# Altium integrated library RCW_IntLib.IntLib: 93 symbols (part 2 of 3)
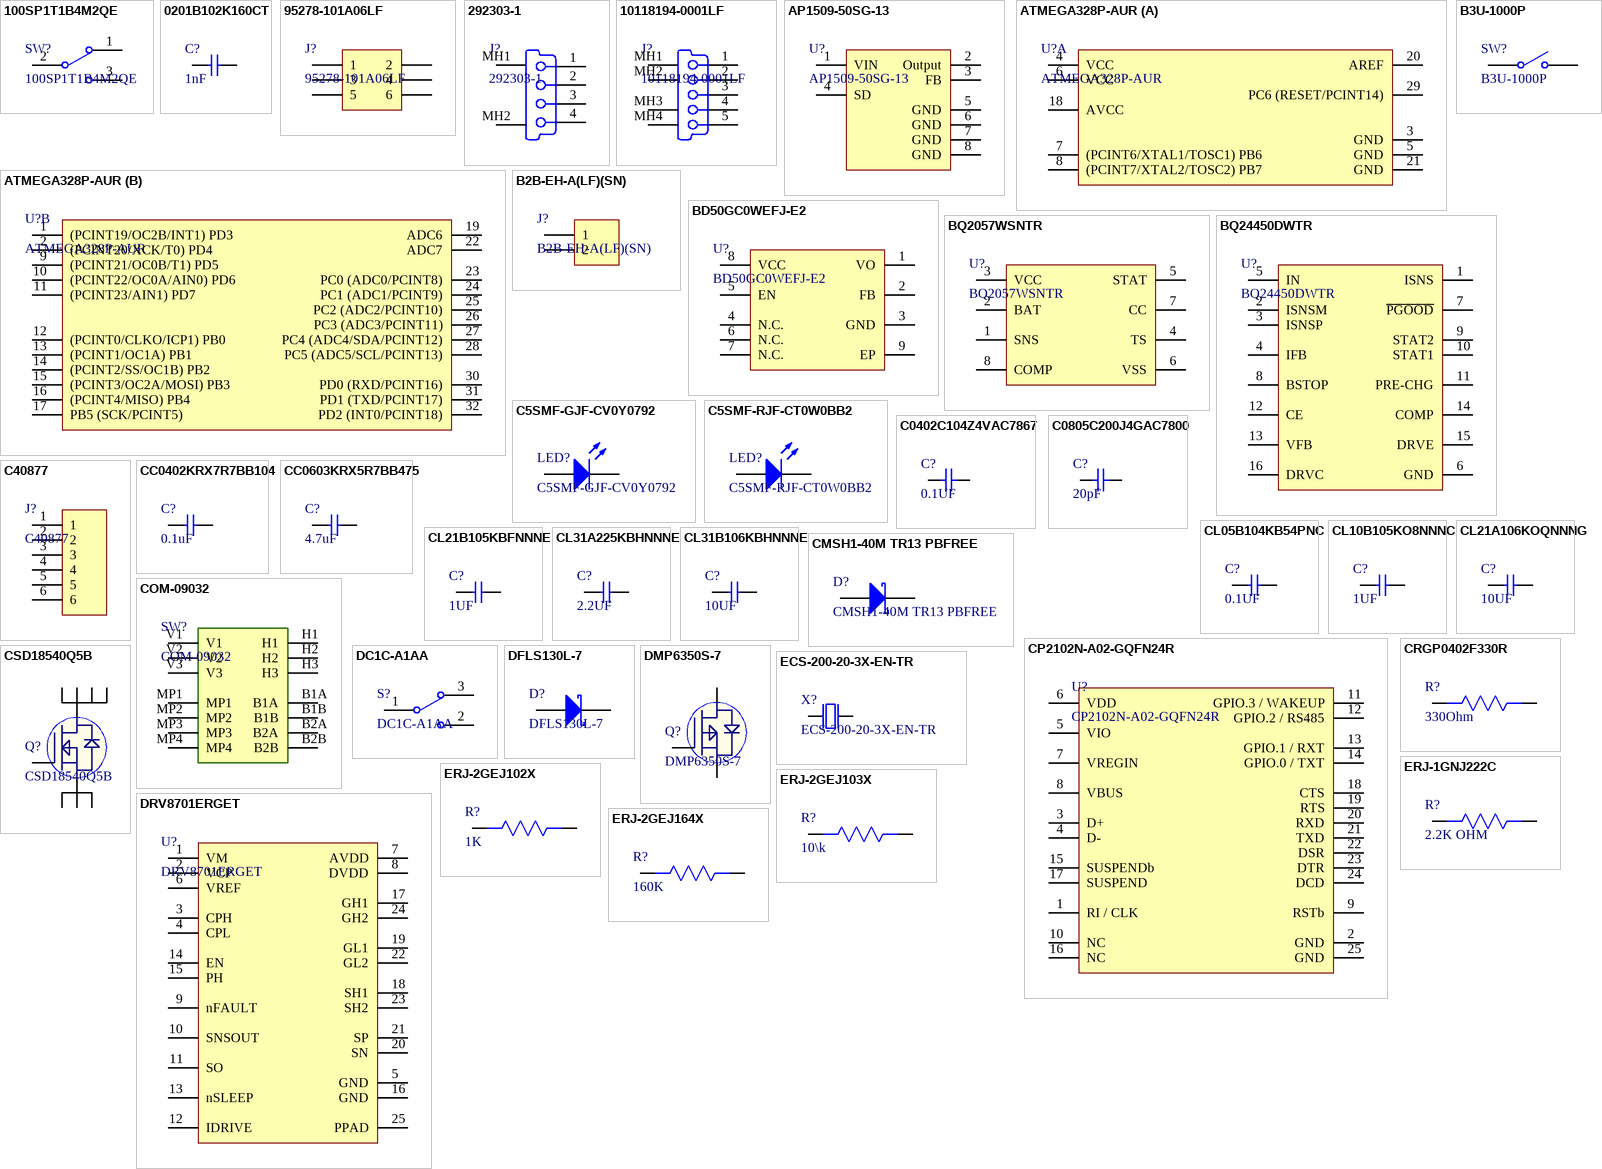
[diagram p3: symbols 100SP1T1B4M2QE to ERJ-2GEJ164X]

## DMP6350S-7
designator Q?
MOSFET P-CHA 60V 720MW SOT23; Manufacturer: Diodes; Continuous Drain Current (ID): 1.5A; Rds On Max: 350mR; Input Capacitance: 206pF; Supplier 1: Digi-Key; Manufacturer Part Number: DMP6350S-7; Stock 1: 30890; Pricing 1: 1=0.41, 10=0.355, 25=0.3316, 100=0.2463, 500=0.19232, 1000=0.15632 (USD); Mount: Surface Mount; Case/Package: TO-236-3; Min Operating Temperature: -55°C; Max Operating Temperature: 150°C; Packaging: Tape and Reel; Drain to Source Voltage (Vdss): 60V; Max Power Dissipation: 720mW; ComponentLink1URL: http://www.farnell.com/datasheets/2814435.pdf?src-supplier=Newark; ComponentLink1Description: http://www.farnell.com/datasheets/2814435.pdf?src-supplier=Newark; ComponentLink2URL: http://www.farnell.com/datasheets/2814435.pdf?src-supplier=Farnell; ComponentLink2Description: http://www.farnell.com/datasheets/2814435.pdf?src-supplier=Farnell; ComponentLink3URL: https://www.diodes.com/assets/Datasheets/DMP6350S.pdf?src-supplier=Digi-Key; ComponentLink3Description: https://www.diodes.com/assets/Datasheets/DMP6350S.pdf?src-supplier=Digi-Key; ComponentLink4URL: http://www.farnell.com/datasheets/2814435.pdf?src-supplier=Element14; ComponentLink4Description: http://www.farnell.com/datasheets/2814435.pdf?src-supplier=Element14; Supplier Part Number 1: DMP6350S-7DICT-ND
footprint SOT23-3 (SOT23, 3-Leads, Body 2.9x1.3mm, Pitch 0.95mm, Lead Span 2.3mm - Reverse Pinning, IPC High Density)
pins: 1 G, 2 S, 3 D

## DRV8701ERGET
designator U?
Motor Driver Power MOSFET Parallel 24-VQFN (4x4); Manufacturer: Texas Instruments; Supplier 1: Digi-Key; Manufacturer Part Number: DRV8701ERGET; Stock 1: 10031; Pricing 1: 1=2.37, 10=2.133, 25=2.0124, 100=1.61 (USD); Mount: Surface Mount; Case/Package: VQFN; Min Operating Temperature: -40°C; Max Operating Temperature: 125°C; Packaging: Tape and Reel; Interface: Parallel; Lead Free: Lead Free; ComponentLink1URL: http://www.ti.com/general/docs/lit/getliterature.tsp?genericPartNumber=DRV8701&&fileType=pdf&src-supplier=Avnet; ComponentLink1Description: http://www.ti.com/general/docs/lit/getliterature.tsp?genericPartNumber=DRV8701&&fileType=pdf&src-supplier=Avnet; ComponentLink2URL: http://www.ti.com/lit/ds/symlink/drv8701.pdf?src-supplier=Digi-Key; ComponentLink2Description: http://www.ti.com/lit/ds/symlink/drv8701.pdf?src-supplier=Digi-Key; Supplier Part Number 1: 296-42155-1-ND
footprint DRV8701ERGET (Motor Driver Power MOSFET Parallel 24-VQFN (4x4))
pins: 1 VM, 2 VCP, 3 CPH, 4 CPL, 5 GND, 6 VREF, 7 AVDD, 8 DVDD, 9 nFAULT, 10 SNSOUT, 11 SO, 12 IDRIVE , 13 nSLEEP , 14 EN, 15 PH, 16 GND, 17 GH1, 18 SH1, 19 GL1, 20 SN, 21 SP, 22 GL2, 23 SH2, 24 GH2, 25 PPAD

## ECS-200-20-3X-EN-TR
designator X?
20MHz ±30ppm Crystal 20pF 50 Ohms HC-49/U; Manufacturer: ECS International; ESR (Equivalent Series Resistance): 50R; Frequency Stability: 50ppm; Supplier 1: Digi-Key; Manufacturer Part Number: ECS-200-20-3X-EN-TR; Stock 1: 19197; Pricing 1: 1=0.53, 10=0.44, 50=0.396, 100=0.352, 500=0.3344, 1000=0.2816 (USD); Mount: Surface Mount; Min Operating Temperature: -40°C; Max Operating Temperature: 85°C; Package Quantity: 1; Frequency: 20MHz; Frequency Tolerance: 30ppm; Load Capacitance: 20pF; Packaging: Tape and Reel; Tolerance: 30ppm; Termination: SMD/SMT; Length: 0.276inch; Height: 0.091inch; Width: 0.161inch; Lead Free: Lead Free; ComponentLink1URL: http://www.ecsxtal.com/store/pdf/CSM-3X.pdf?src-supplier=Digi-Key; ComponentLink1Description: http://www.ecsxtal.com/store/pdf/CSM-3X.pdf?src-supplier=Digi-Key; Supplier Part Number 1: XC1796DKR-ND
footprint ECS-200-20-3X-EN-TR (20MHz ±30ppm Crystal 20pF 50 Ohms HC-49/US)
pins: 1 inp, 2 out

## ERJ-1GNJ222C
designator R?, comment 2.2K OHM
RES SMD 2.2K OHM 5% 1/20W 0201; Manufacturer: Panasonic; Manufacturer Part Number: ERJ-1GNJ222C; Resistance: 2.2kR; Power Rating: 50mW; Voltage Rating: 25V; Temperature Coefficient: 200ppm/°C; Supplier 1: Digi-Key; Stock 1: 63119; Pricing 1: 1=0.1, 10=0.027, 100=0.011, 1000=0.00496, 2500=0.0043, 5000=0.00355 (USD); Mount: Surface Mount; Case/Package: 0201; Case Code (Metric): 0603; Case Code (Imperial): 0201; Min Operating Temperature: -55°C; Max Operating Temperature: 125°C; Package Quantity: 15000; Tolerance: 5%; Packaging: Tape and Reel; Composition: Thick Film; Number of Terminations: 2; Max Power Dissipation: 50mW; Length: 0.024inch; Height: 0.01inch; Width: 0.012inch; Supplier Part Number 1: P123277DKR-ND
footprint Res-0201
pins: 1, 2

## ERJ-2GEJ102X
designator R?, comment 1K
RES SMD 1K OHM 5% 1/10W 0402; Manufacturer: Panasonic; Manufacturer Part Number: ERJ-2GEJ102X; Resistance: 1kR; Temperature Coefficient: 200ppm/°C; Voltage Rating: 50V; Power Rating: 100mW; Supplier 1: Digi-Key; Stock 1: 3855795; Pricing 1: 1=0.1, 10=0.032, 100=0.0129, 1000=0.00578, 2500=0.00502, 5000=0.00414 (USD); Mount: Surface Mount; Case/Package: 0402; Contact Plating: Tin; Case Code (Metric): 1005; Case Code (Imperial): 0402; Min Operating Temperature: -55°C; Max Operating Temperature: 155°C; Tolerance: 5%; Composition: Thick Film; Packaging: Tape and Reel; Package Quantity: 1; Number of Terminations: 2; Termination: SMD/SMT; Military Standard: Not; Max Power Dissipation: 100mW; Voltage Rating (DC): 50V; Features: Automotive AEC-Q200; Working Voltage: 50V; Length: 1mm; Height: 0.35mm; Width: 0.02inch; Depth: 0.5mm; Radiation Hardening: No; REACH SVHC: No SVHC; Lead Free: Lead Free; ComponentLink1URL: https://industrial.panasonic.com/cdbs/www-data/pdf/RDA0000/AOA0000C301.pdf?src-supplier=Future+Electronics; ComponentLink1Description: https://industrial.panasonic.com/cdbs/www-data/pdf/RDA0000/AOA0000C301.pdf?src-supplier=Future+Electronics; ComponentLink2URL: http://www.jameco.com/Jameco/Products/ProdDS/1986781.pdf?src-supplier=Jameco; ComponentLink2Description: http://www.jameco.com/Jameco/Products/ProdDS/1986781.pdf?src-supplier=Jameco; ComponentLink3URL: http://www.farnell.com/datasheets/2059623.pdf?src-supplier=Farnell; ComponentLink3Description: http://www.farnell.com/datasheets/2059623.pdf?src-supplier=Farnell; ComponentLink4URL: http://industrial.panasonic.com/www-data/pdf/AOA0000/AOA0000CE1.pdf?src-supplier=Avnet; ComponentLink4Description: http://industrial.panasonic.com/www-data/pdf/AOA0000/AOA0000CE1.pdf?src-supplier=Avnet; ComponentLink5URL: http://www.alliedelec.com/m/d/51cd0790071e1666bdb9d00c57fcf960.pdf?src-supplier=Allied+Electronics; ComponentLink5Description: http://www.alliedelec.com/m/d/51cd0790071e1666bdb9d00c57fcf960.pdf?src-supplier=Allied+Electronics; ComponentLink6URL: http://industrial.panasonic.com/www-data/pdf/AOA0000/AOA0000CE1.pdf?src-supplier=Avnet+Europe; ComponentLink6Description: http://industrial.panasonic.com/www-data/pdf/AOA0000/AOA0000CE1.pdf?src-supplier=Avnet+Europe; ComponentLink7URL: http://www.farnell.com/datasheets/2059623.pdf?src-supplier=Element14; ComponentLink7Description: http://www.farnell.com/datasheets/2059623.pdf?src-supplier=Element14; ComponentLink8URL: http://industrial.panasonic.com/cdbs/www-data/pdf/RDA0000/AOA0000C301.pdf?src-supplier=Farnell; ComponentLink8Description: http://industrial.panasonic.com/cdbs/www-data/pdf/RDA0000/AOA0000C301.pdf?src-supplier=Farnell; ComponentLink9URL: http://industrial.panasonic.com/www-data/pdf/AOA0000/AOA0000CE1.pdf?src-supplier=Avnet+Asia; ComponentLink9Description: http://industrial.panasonic.com/www-data/pdf/AOA0000/AOA0000CE1.pdf?src-supplier=Avnet+Asia; Supplier Part Number 1: P1.0KJCT-ND
footprint Res0402
pins: 1, 2

## ERJ-2GEJ103X
designator R?, comment 10\k
10 kOhms ±5% 0.1W, 1/10W Chip Resistor 0402 (1005 Metric) Automotive AEC-Q200 Thick Film; Manufacturer: Panasonic; Manufacturer Part Number: ERJ-2GEJ103X; Resistance: 10kR; Temperature Coefficient: 200ppm/°C; Power Rating: 100mW; Voltage Rating: 50V; Supplier 1: Digi-Key; Stock 1: 3175387; Pricing 1: 1=0.1, 10=0.028, 100=0.0115, 1000=0.00517, 2500=0.00448, 5000=0.00371 (USD); Mount: Surface Mount; Case/Package: 0402; Contact Plating: Tin; Case Code (Metric): 1005; Case Code (Imperial): 0402; Min Operating Temperature: -55°C; Max Operating Temperature: 155°C; Tolerance: 5%; Packaging: Cut Tape; Composition: Thick Film; Package Quantity: 1; Number of Terminations: 2; Termination: SMD/SMT; Military Standard: Not; Max Power Dissipation: 100mW; Voltage Rating (DC): 50V; Features: Automotive AEC-Q200; Length: 1mm; Height: 0.35mm; Depth: 0.5mm; Width: 0.02inch; Radiation Hardening: No; REACH SVHC: No SVHC; Lead Free: Lead Free; ComponentLink1URL: http://industrial.panasonic.com/www-data/pdf/AOA0000/AOA0000CE1.pdf?src-supplier=Avnet+Europe; ComponentLink1Description: http://industrial.panasonic.com/www-data/pdf/AOA0000/AOA0000CE1.pdf?src-supplier=Avnet+Europe; ComponentLink2URL: http://www.farnell.com/datasheets/1678796.pdf?src-supplier=Element14; ComponentLink2Description: http://www.farnell.com/datasheets/1678796.pdf?src-supplier=Element14; ComponentLink3URL: http://www.mouser.com/ds/2/315/AOA0000CE1-37422.pdf?src-supplier=Mouser; ComponentLink3Description: http://www.mouser.com/ds/2/315/AOA0000CE1-37422.pdf?src-supplier=Mouser; ComponentLink4URL: http://industrial.panasonic.com/cdbs/www-data/pdf/RDA0000/AOA0000C301.pdf?src-supplier=Farnell; ComponentLink4Description: http://industrial.panasonic.com/cdbs/www-data/pdf/RDA0000/AOA0000C301.pdf?src-supplier=Farnell; ComponentLink5URL: https://www.alliedelec.com/m/d/51cd0790071e1666bdb9d00c57fcf960.pdf?src-supplier=Allied+Electronics; ComponentLink5Description: https://www.alliedelec.com/m/d/51cd0790071e1666bdb9d00c57fcf960.pdf?src-supplier=Allied+Electronics; ComponentLink6URL: http://www.jameco.com/Jameco/Products/ProdDS/1935721.pdf?src-supplier=Jameco; ComponentLink6Description: http://www.jameco.com/Jameco/Products/ProdDS/1935721.pdf?src-supplier=Jameco; ComponentLink7URL: http://industrial.panasonic.com/www-data/pdf/AOA0000/AOA0000CE1.pdf?src-supplier=Avnet; ComponentLink7Description: http://industrial.panasonic.com/www-data/pdf/AOA0000/AOA0000CE1.pdf?src-supplier=Avnet; Supplier Part Number 1: P10KJDKR-ND
footprint Res0402
pins: 1, 2

## ERJ-2GEJ164X
designator R?, comment 160K
RES SMD 160K OHM 5% 1/10W 0402; Manufacturer: Panasonic; Manufacturer Part Number: ERJ2GEJ164X; Resistance: 160kR; Power Rating: 100mW; Voltage Rating: 50V; Temperature Coefficient: 200ppm/°C; Supplier 1: Digi-Key; Stock 1: 71161; Pricing 1: 1=0.1, 10=0.021, 100=0.0084, 1000=0.00379, 2500=0.00329, 5000=0.00272 (USD); Mount: Surface Mount; Case/Package: 0402; Case Code (Imperial): 0402; Case Code (Metric): 1005; Contact Plating: Tin; Min Operating Temperature: -55°C; Max Operating Temperature: 155°C; Tolerance: 5%; Packaging: Tape and Reel; Package Quantity: 1; Termination: SMD/SMT; Composition: Thick Film; Number of Terminations: 2; Military Standard: Not; Max Power Dissipation: 100mW; Voltage Rating (DC): 50V; Features: Automotive AEC-Q200; Length: 1mm; Height: 0.35mm; Width: 0.5mm; Depth: 0.5mm; Radiation Hardening: No; REACH SVHC: No SVHC; Lead Free: Contains Lead; ComponentLink1URL: http://industrial.panasonic.com/www-data/pdf/AOA0000/AOA0000CE1.pdf?src-supplier=Avnet; ComponentLink1Description: http://industrial.panasonic.com/www-data/pdf/AOA0000/AOA0000CE1.pdf?src-supplier=Avnet; ComponentLink2URL: http://www.farnell.com/datasheets/1678796.pdf?src-supplier=Element14; ComponentLink2Description: http://www.farnell.com/datasheets/1678796.pdf?src-supplier=Element14; Supplier Part Number 1: P160KJDKR-ND
footprint Res0402
pins: 1, 2

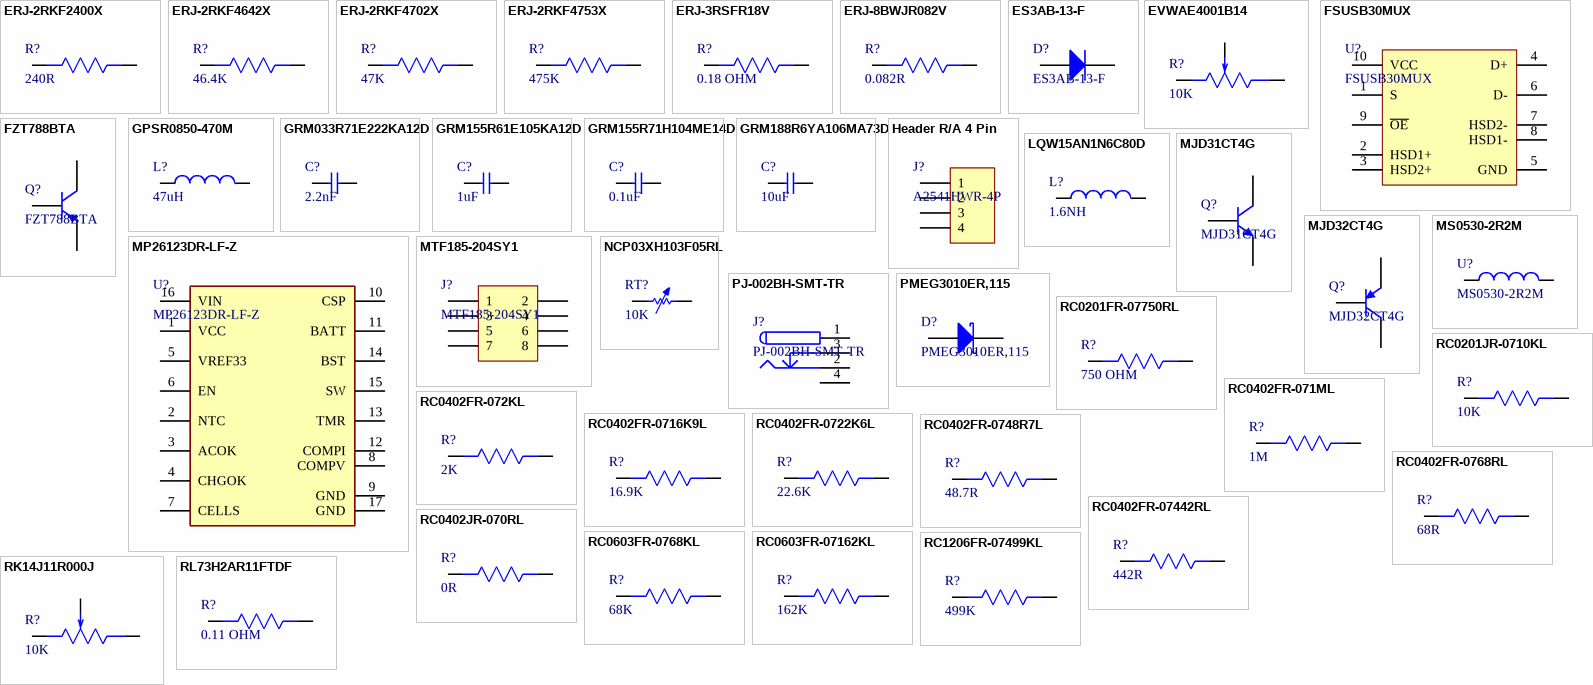
[diagram p1: symbols ERJ-2RKF2400X to RL73H2AR11FTDF]

## ERJ-2RKF2400X
designator R?, comment 240R
RES SMD 240 OHM 1% 1/10W 0402; Manufacturer: Panasonic; Manufacturer Part Number: ERJ-2RKF2400X; Power Rating: 100mW; Voltage Rating: 50V; Temperature Coefficient: 100ppm/°C; Supplier 1: Digi-Key; Stock 1: 969166; Pricing 1: 1=0.1, 10=0.036, 100=0.0145, 1000=0.00649, 2500=0.00564, 5000=0.00466 (USD); Mount: Surface Mount; Case/Package: 0402; Case Code (Metric): 1005; Case Code (Imperial): 0402; Contact Plating: Tin; Min Operating Temperature: -55°C; Max Operating Temperature: 155°C; Resistance: 240R; Tolerance: 1%; Packaging: Tape and Reel; Package Quantity: 1; Composition: Thick Film; Number of Terminations: 2; Termination: SMD/SMT; Military Standard: Not; Max Power Dissipation: 100mW; Voltage Rating (DC): 50V; Features: Automotive AEC-Q200; Working Voltage: 50V; Length: 1mm; Height: 0.35mm; Width: 0.02inch; Depth: 0.5mm; Radiation Hardening: No; REACH SVHC: No SVHC; Lead Free: Lead Free; ComponentLink1URL: http://www.farnell.com/datasheets/426256.pdf?src-supplier=Element14; ComponentLink1Description: http://www.farnell.com/datasheets/426256.pdf?src-supplier=Element14; ComponentLink2URL: http://industrial.panasonic.com/www-data/pdf/AOA0000/AOA0000CE2.pdf?src-supplier=Avnet; ComponentLink2Description: http://industrial.panasonic.com/www-data/pdf/AOA0000/AOA0000CE2.pdf?src-supplier=Avnet; ComponentLink3URL: http://www.mouser.com/ds/2/315/AOA0000CE2-37512.pdf?src-supplier=Mouser; ComponentLink3Description: http://www.mouser.com/ds/2/315/AOA0000CE2-37512.pdf?src-supplier=Mouser; ComponentLink4URL: http://www.farnell.com/datasheets/1678782.pdf?src-supplier=Element14; ComponentLink4Description: http://www.farnell.com/datasheets/1678782.pdf?src-supplier=Element14; ComponentLink5URL: https://www.alliedelec.com/m/d/623f45ff1957d936ff56d46fd1c28cac.pdf?src-supplier=Allied+Electronics; ComponentLink5Description: https://www.alliedelec.com/m/d/623f45ff1957d936ff56d46fd1c28cac.pdf?src-supplier=Allied+Electronics; ComponentLink6URL: http://industrial.panasonic.com/cdbs/www-data/pdf/RDA0000/AOA0000C304.pdf?src-supplier=Farnell; ComponentLink6Description: http://industrial.panasonic.com/cdbs/www-data/pdf/RDA0000/AOA0000C304.pdf?src-supplier=Farnell; ComponentLink7URL: http://www.farnell.com/datasheets/1911175.pdf?src-supplier=Farnell; ComponentLink7Description: http://www.farnell.com/datasheets/1911175.pdf?src-supplier=Farnell; Supplier Part Number 1: P240LCT-ND
footprint Res0402
pins: 1, 2

## ERJ-2RKF4642X
designator R?, comment 46.4K
RES SMD 46.4K OHM 1% 1/10W 0402; Manufacturer: Panasonic; Manufacturer Part Number: ERJ-2RKF4642X; Resistance: 46.4kR; Temperature Coefficient: 100ppm/°C; Power Rating: 100mW; Voltage Rating: 50V; Supplier 1: Digi-Key; Stock 1: 59686; Pricing 1: 1=0.1, 10=0.024, 100=0.0097, 1000=0.00437, 2500=0.0038, 5000=0.00314 (USD); Mount: Surface Mount; Case/Package: 0402; Contact Plating: Tin; Case Code (Metric): 1005; Case Code (Imperial): 0402; Min Operating Temperature: -55°C; Max Operating Temperature: 155°C; Tolerance: 1%; Composition: Thick Film; Packaging: Tape and Reel; Package Quantity: 1; Number of Terminations: 2; Termination: SMD/SMT; Military Standard: Not; Max Power Dissipation: 100mW; Voltage Rating (DC): 50V; Features: Automotive AEC-Q200; Length: 1mm; Height: 0.35mm; Width: 0.02inch; Depth: 0.5mm; Radiation Hardening: No; REACH SVHC: Yes; Lead Free: Lead Free; ComponentLink1URL: http://www.industrial.panasonic.com/www-data/pdf/AOA0000/AOA0000CE2.pdf?src-supplier=Element14; ComponentLink1Description: http://www.industrial.panasonic.com/www-data/pdf/AOA0000/AOA0000CE2.pdf?src-supplier=Element14; ComponentLink2URL: http://industrial.panasonic.com/www-data/pdf/AOA0000/AOA0000CE2.pdf?src-supplier=Avnet; ComponentLink2Description: http://industrial.panasonic.com/www-data/pdf/AOA0000/AOA0000CE2.pdf?src-supplier=Avnet; ComponentLink3URL: http://www.farnell.com/datasheets/1678782.pdf?src-supplier=Farnell; ComponentLink3Description: http://www.farnell.com/datasheets/1678782.pdf?src-supplier=Farnell; ComponentLink4URL: http://www.farnell.com/datasheets/1678782.pdf?src-supplier=Element14; ComponentLink4Description: http://www.farnell.com/datasheets/1678782.pdf?src-supplier=Element14; ComponentLink5URL: http://www.farnell.com/datasheets/1911175.pdf?src-supplier=Farnell; ComponentLink5Description: http://www.farnell.com/datasheets/1911175.pdf?src-supplier=Farnell; ComponentLink6URL: https://www.alliedelec.com/m/d/623f45ff1957d936ff56d46fd1c28cac.pdf?src-supplier=Allied+Electronics; ComponentLink6Description: https://www.alliedelec.com/m/d/623f45ff1957d936ff56d46fd1c28cac.pdf?src-supplier=Allied+Electronics; Supplier Part Number 1: P46.4KLDKR-ND
footprint Res0402
pins: 1, 2

## ERJ-2RKF4702X
designator R?, comment 47K
RES SMD 47K OHM 1% 1/10W 0402; Manufacturer: Panasonic; Manufacturer Part Number: ERJ-2RKF4702X; Resistance: 47kR; Temperature Coefficient: 100ppm/°C; Voltage Rating: 50V; Power Rating: 100mW; Supplier 1: Digi-Key; Stock 1: 1741209; Pricing 1: 1=0.1, 10=0.045, 100=0.0183, 1000=0.00822, 2500=0.00713, 5000=0.00589 (USD); Mount: Surface Mount; Case/Package: 0402; Number of Pins: 2; Contact Plating: Tin; Case Code (Imperial): 0402; Case Code (Metric): 1005; Min Operating Temperature: -55°C; Max Operating Temperature: 155°C; Tolerance: 1%; Composition: Thick Film; Packaging: Tape and Reel; Package Quantity: 1; Termination: SMD/SMT; Number of Terminations: 2; Military Standard: Not; Max Power Dissipation: 100mW; Voltage Rating (DC): 50V; Features: Automotive AEC-Q200; Length: 1mm; Height: 0.35mm; Width: 0.5mm; Depth: 0.5mm; Radiation Hardening: No; REACH SVHC: No SVHC; Lead Free: Lead Free; ComponentLink1URL: http://www.farnell.com/datasheets/1911175.pdf?src-supplier=Element14; ComponentLink1Description: http://www.farnell.com/datasheets/1911175.pdf?src-supplier=Element14; ComponentLink2URL: http://industrial.panasonic.com/www-data/pdf/AOA0000/AOA0000CE2.pdf?src-supplier=Avnet; ComponentLink2Description: http://industrial.panasonic.com/www-data/pdf/AOA0000/AOA0000CE2.pdf?src-supplier=Avnet; ComponentLink3URL: http://industrial.panasonic.com/www-data/pdf/AOA0000/AOA0000CE2.pdf?src-supplier=Avnet+Asia; ComponentLink3Description: http://industrial.panasonic.com/www-data/pdf/AOA0000/AOA0000CE2.pdf?src-supplier=Avnet+Asia; ComponentLink4URL: http://www.farnell.com/datasheets/1678782.pdf?src-supplier=Element14; ComponentLink4Description: http://www.farnell.com/datasheets/1678782.pdf?src-supplier=Element14; ComponentLink5URL: http://industrial.panasonic.com/www-data/pdf/AOA0000/AOA0000CE2.pdf?src-supplier=Element14; ComponentLink5Description: http://industrial.panasonic.com/www-data/pdf/AOA0000/AOA0000CE2.pdf?src-supplier=Element14; ComponentLink6URL: https://www.alliedelec.com/m/d/623f45ff1957d936ff56d46fd1c28cac.pdf?src-supplier=Allied+Electronics; ComponentLink6Description: https://www.alliedelec.com/m/d/623f45ff1957d936ff56d46fd1c28cac.pdf?src-supplier=Allied+Electronics; ComponentLink7URL: http://industrial.panasonic.com/cdbs/www-data/pdf/RDA0000/AOA0000C304.pdf?src-supplier=Farnell; ComponentLink7Description: http://industrial.panasonic.com/cdbs/www-data/pdf/RDA0000/AOA0000C304.pdf?src-supplier=Farnell; Supplier Part Number 1: P47.0KLCT-ND
footprint Res0402
pins: 1, 2

## ERJ-2RKF4753X
designator R?, comment 475K
RES SMD 475K OHM 1% 1/10W 0402; Manufacturer: Panasonic; Manufacturer Part Number: ERJ-2RKF4753X; Resistance: 475kR; Power Rating: 100mW; Voltage Rating: 50V; Temperature Coefficient: 100ppm/°C; Supplier 1: Digi-Key; Stock 1: 83446; Pricing 1: 1=0.1, 10=0.041, 100=0.0166, 1000=0.00747, 2500=0.00649, 5000=0.00536 (USD); Mount: Surface Mount; Case/Package: 0402; Case Code (Metric): 1005; Case Code (Imperial): 0402; Contact Plating: Tin; Min Operating Temperature: -55°C; Max Operating Temperature: 155°C; Tolerance: 1%; Packaging: Tape and Reel; Package Quantity: 10000; Composition: Thick Film; Number of Terminations: 2; Termination: SMD/SMT; Military Standard: Not; Max Power Dissipation: 100mW; Voltage Rating (DC): 50V; Length: 1mm; Height: 0.35mm; Width: 0.02inch; Depth: 0.5mm; REACH SVHC: Yes; Lead Free: Lead Free; ComponentLink1URL: http://www.industrial.panasonic.com/www-data/pdf/AOA0000/AOA0000CE2.pdf?src-supplier=Element14; ComponentLink1Description: http://www.industrial.panasonic.com/www-data/pdf/AOA0000/AOA0000CE2.pdf?src-supplier=Element14; ComponentLink2URL: http://www.farnell.com/datasheets/1678782.pdf?src-supplier=Element14; ComponentLink2Description: http://www.farnell.com/datasheets/1678782.pdf?src-supplier=Element14; ComponentLink3URL: http://industrial.panasonic.com/www-data/pdf/AOA0000/AOA0000CE2.pdf?src-supplier=Avnet; ComponentLink3Description: http://industrial.panasonic.com/www-data/pdf/AOA0000/AOA0000CE2.pdf?src-supplier=Avnet; ComponentLink4URL: http://www.farnell.com/datasheets/1678782.pdf?src-supplier=Farnell; ComponentLink4Description: http://www.farnell.com/datasheets/1678782.pdf?src-supplier=Farnell; ComponentLink5URL: http://industrial.panasonic.com/cdbs/www-data/pdf/RDA0000/AOA0000C304.pdf?src-supplier=Farnell; ComponentLink5Description: http://industrial.panasonic.com/cdbs/www-data/pdf/RDA0000/AOA0000C304.pdf?src-supplier=Farnell; ComponentLink6URL: http://www.alliedelec.com/m/d/623f45ff1957d936ff56d46fd1c28cac.pdf?src-supplier=Allied+Electronics; ComponentLink6Description: http://www.alliedelec.com/m/d/623f45ff1957d936ff56d46fd1c28cac.pdf?src-supplier=Allied+Electronics; Supplier Part Number 1: P475KLCT-ND
footprint Res0402
pins: 1, 2

## ERJ-3RSFR18V
designator R?, comment 0.18 OHM
RES 0.18 OHM 1% 1/10W 0603; Manufacturer: Panasonic; Manufacturer Part Number: ERJ-3RSFR18V; Resistance: 180mR; Temperature Coefficient: 300ppm/°C; Power Rating: 100mW; Supplier 1: Digi-Key; Stock 1: 13471; Pricing 1: 1=0.29, 10=0.249, 25=0.1812, 50=0.1314, 100=0.0974, 250=0.07476, 500=0.05892, 1000=0.04079 (USD); Mount: Surface Mount; Case/Package: 0603; Number of Pins: 2; Contact Plating: Tin; Case Code (Metric): 1608; Case Code (Imperial): 0603; Min Operating Temperature: -55°C; Max Operating Temperature: 125°C; Tolerance: 1%; Composition: Thick Film; Packaging: Tape and Reel; Package Quantity: 5000; Number of Terminations: 2; Termination: SMD/SMT; Military Standard: Not; Max Power Dissipation: 100mW; Length: 1.6mm; Height: 0.45mm; Width: 0.031inch; Depth: 0.8mm; Radiation Hardening: No; REACH SVHC: No SVHC; Lead Free: Lead Free; ComponentLink1URL: http://industrial.panasonic.com/www-data/pdf/AOA0000/AOA0000CE3.pdf?src-supplier=Avnet; ComponentLink1Description: http://industrial.panasonic.com/www-data/pdf/AOA0000/AOA0000CE3.pdf?src-supplier=Avnet; ComponentLink2URL: http://www.farnell.com/datasheets/1951809.pdf?src-supplier=Farnell; ComponentLink2Description: http://www.farnell.com/datasheets/1951809.pdf?src-supplier=Farnell; ComponentLink3URL: http://industrial.panasonic.com/www-data/pdf/AOA0000/AOA0000CE3.pdf?src-supplier=Avnet+Europe; ComponentLink3Description: http://industrial.panasonic.com/www-data/pdf/AOA0000/AOA0000CE3.pdf?src-supplier=Avnet+Europe; ComponentLink4URL: http://www.farnell.com/datasheets/391509.pdf?src-supplier=Element14; ComponentLink4Description: http://www.farnell.com/datasheets/391509.pdf?src-supplier=Element14; ComponentLink5URL: http://uk.rs-online.com/webdocs/13b8/0900766b813b869e.pdf?src-supplier=RSComponents; ComponentLink5Description: http://uk.rs-online.com/webdocs/13b8/0900766b813b869e.pdf?src-supplier=RSComponents; ComponentLink6URL: http://www.mouser.com/ds/2/315/AOA0000C295-1109214.pdf?src-supplier=Mouser; ComponentLink6Description: http://www.mouser.com/ds/2/315/AOA0000C295-1109214.pdf?src-supplier=Mouser; Supplier Part Number 1: P.18AJDKR-ND
footprint Res0603
pins: 1, 2

## ERJ-8BWJR082V
designator R?, comment 0.082R
RES 0.082 OHM 5% 1W 1206; Manufacturer: Panasonic; Manufacturer Part Number: ERJ-8BWJR082V; Resistance: 82mR; Temperature Coefficient: 100ppm/°C; Supplier 1: Digi-Key; Stock 1: 5726; Pricing 1: 1=0.67, 10=0.476, 100=0.2477, 1000=0.13336, 2500=0.12955 (USD); Mount: Surface Mount; Case/Package: 1206; Contact Plating: Tin; Case Code (Metric): 3216; Case Code (Imperial): 1206; Min Operating Temperature: -55°C; Max Operating Temperature: 155°C; Power Rating: 1W; Tolerance: 5%; Composition: Thick Film; Packaging: Tape and Reel; Package Quantity: 1; Number of Terminations: 2; Termination: SMD/SMT; Max Power Dissipation: 1W; Features: Automotive AEC-Q200; Length: 3.2mm; Height: 0.65mm; Width: 0.063inch; Depth: 1.6mm; Radiation Hardening: No; ComponentLink1URL: https://industrial.panasonic.com/cdbs/www-data/pdf/RDN0000/AOA0000C313.pdf?src-supplier=Digi-Key; ComponentLink1Description: https://industrial.panasonic.com/cdbs/www-data/pdf/RDN0000/AOA0000C313.pdf?src-supplier=Digi-Key; ComponentLink2URL: http://industrial.panasonic.com/www-data/pdf/AOA0000/AOA0000CE3.pdf?src-supplier=Avnet+Europe; ComponentLink2Description: http://industrial.panasonic.com/www-data/pdf/AOA0000/AOA0000CE3.pdf?src-supplier=Avnet+Europe; ComponentLink3URL: https://www.alliedelec.com/m/d/343577d27580f3e2a275b8e77c10f6b8.pdf?src-supplier=Allied+Electronics; ComponentLink3Description: https://www.alliedelec.com/m/d/343577d27580f3e2a275b8e77c10f6b8.pdf?src-supplier=Allied+Electronics; ComponentLink4URL: http://www.mouser.com/ds/2/315/AOA0000CE3-72189.pdf?src-supplier=Mouser; ComponentLink4Description: http://www.mouser.com/ds/2/315/AOA0000CE3-72189.pdf?src-supplier=Mouser; ComponentLink5URL: http://uk.rs-online.com/webdocs/13b8/0900766b813b869e.pdf?src-supplier=RSComponents; ComponentLink5Description: http://uk.rs-online.com/webdocs/13b8/0900766b813b869e.pdf?src-supplier=RSComponents; Supplier Part Number 1: P.082AVDKR-ND
footprint Res1206
pins: 1, 2

## ES3AB-13-F
designator D?
DIODE GEN PURP 50V 3A SMB; Manufacturer: Diodes; Peak Reverse Current: 10uA; Reverse Recovery Time: 25ns; Peak Non-Repetitive Surge Current: 100A; Element Configuration: Single; Forward Voltage: 900mV; Polarity: Standard; Capacitance: 45pF; Supplier 1: Digi-Key; Manufacturer Part Number: ES3AB-13-F; Stock 1: 36847; Pricing 1: 1=0.62, 10=0.53, 25=0.4948, 100=0.3676, 250=0.34924, 500=0.28704, 1000=0.23331 (USD); Mount: Surface Mount; Case/Package: SMB; Number of Pins: 2; Weight: 0.00328oz; Min Operating Temperature: -55°C; Max Operating Temperature: 150°C; Forward Current: 3A; Max Repetitive Reverse Voltage (Vrrm): 50V; Package Quantity: 3000; Packaging: Tape and Reel; Max Surge Current: 100A; Recovery Time: 25ns; Reverse Voltage (DC): 50V; Average Rectified Current: 3A; Termination: SMD/SMT; Voltage Rating (DC): 50V; Current Rating: 3A; Output Current: 3A; Max Reverse Voltage (DC): 50V; Length: 4.57mm; Height: 2.42mm; Width: 3.94mm; Radiation Hardening: No; Lead Free: Lead Free; ComponentLink1URL: http://www.diodes.com///datasheets/ds14003.pdf?src-supplier=Avnet+Europe; ComponentLink1Description: http://www.diodes.com///datasheets/ds14003.pdf?src-supplier=Avnet+Europe; ComponentLink2URL: http://www.diodes.com///datasheets/ds14003.pdf?src-supplier=Avnet; ComponentLink2Description: http://www.diodes.com///datasheets/ds14003.pdf?src-supplier=Avnet; ComponentLink3URL: https://www.verical.com/server-webapp/html/getDatasheet?partID=61156&src-supplier=Verical; ComponentLink3Description: https://www.verical.com/server-webapp/html/getDatasheet?partID=61156&src-supplier=Verical; ComponentLink4URL: http://www.diodes.com/_files/datasheets/ds14003.pdf?src-supplier=Future+Electronics; ComponentLink4Description: http://www.diodes.com/_files/datasheets/ds14003.pdf?src-supplier=Future+Electronics; Supplier Part Number 1: ES3AB-FDIDKR-ND
footprint ES3AB-13-F (DIODE GEN PURP 50V 3A SMB)
pins: 1 A, 2 K

## EVWAE4001B14
designator R?, comment 10K
10K ±30% SMD Potentiometers & Variable Resistors RoHS; Manufacturer: Panasonic; Manufacturer Part Number: EVW-AE4001B14; Resistance: 10kR; Min Supply Voltage (DC): 5V; Power Rating: 50mW; Linearity: 2%; Sensing Method: Resistive; Actuator Type: Hole for Shaft; Supplier 1: Digi-Key; Stock 1: 4321; Pricing 1: 1=1.75, 10=1.537, 25=1.378, 50=1.325, 100=1.272, 250=1.219, 500=1.007 (USD); Mount: Surface Mount,Through Hole; Number of Pins: 4; Contact Plating: Silver; Min Operating Temperature: -40°C; Max Operating Temperature: 85°C; Tolerance: 30%; Type: Potentiometer; Packaging: Tape and Reel; Package Quantity: 1; Max Supply Voltage: 5V; Termination: SMD/SMT; Composition: Potentiometer; Military Standard: Not; Length: 10.6mm; Depth: 15.4mm; Radiation Hardening: No; REACH SVHC: Unknown; Lead Free: Lead Free; ComponentLink1URL: http://www.industrial.panasonic.com/www-data/pdf/AON0000/AON0000CE6.pdf?src-supplier=Avnet; ComponentLink1Description: http://www.industrial.panasonic.com/www-data/pdf/AON0000/AON0000CE6.pdf?src-supplier=Avnet; ComponentLink2URL: https://media.digikey.com/pdf/Data%20Sheets/Panasonic%20Resistors%20Thermistors%20PDFs/EVWAE4001B14.pdf?src-supplier=Digi-Key; ComponentLink2Description: https://media.digikey.com/pdf/Data%20Sheets/Panasonic%20Resistors%20Thermistors%20PDFs/EVWAE4001B14.pdf?src-supplier=Digi-Key; ComponentLink3URL: https://industrial.panasonic.com/cdbs/www-data/pdf/ARE0000/ARE0000C1.pdf?src-supplier=Digi-Key; ComponentLink3Description: https://industrial.panasonic.com/cdbs/www-data/pdf/ARE0000/ARE0000C1.pdf?src-supplier=Digi-Key; Supplier Part Number 1: P12426DKR-ND
pins: 1 ccw, 2 wiper, 3 cw

## FSUSB30MUX
designator U?
IC USB SWITCH 2X2 10MSOP; Manufacturer: ON Semiconductor / Fairchild; Min Supply Voltage: 3V; Max Supply Voltage: 4.3V; Data Rate: 480Mbps; Bandwidth: 750MHz; Propagation Delay: 0.25ns; Number of Channels: 1; Number of Inputs: 2; Number of Outputs: 4; On-State Resistance: 10R; Turn-Off Delay Time: 4ns; Turn-On Delay Time: 7ns; Supply Type: Single; Throw Configuration: DPST; Drain to Source Resistance: 4.5R; USB Standard: USB 2.0; Supplier 1: Digi-Key; Manufacturer Part Number: FSUSB30MUX; Stock 1: 4396; Pricing 1: 1=0.56, 10=0.495, 25=0.4652, 100=0.3525, 250=0.3, 500=0.285, 1000=0.2175 (USD); Mount: Surface Mount; Case/Package: MSOP; Number of Pins: 10; Weight: 0.1125g; Min Operating Temperature: -40°C; Max Operating Temperature: 85°C; Packaging: Tape and Reel; Package Quantity: 1; Number of Ports: 2; Termination: SMD/SMT; Length: 3mm; Height: 1.1mm; Width: 3mm; Radiation Hardening: No; REACH SVHC: No SVHC; Lead Free: Lead Free; ComponentLink1URL: http://www.farnell.com/datasheets/2152074.pdf?src-supplier=Element14; ComponentLink1Description: http://www.farnell.com/datasheets/2152074.pdf?src-supplier=Element14; ComponentLink2URL: http://www.fairchildsemi.com/ds/FS/FSUSB30.pdf?src-supplier=Farnell; ComponentLink2Description: http://www.fairchildsemi.com/ds/FS/FSUSB30.pdf?src-supplier=Farnell; ComponentLink3URL: http://www.fairchildsemi.com/ds/FS/FSUSB30.pdf?src-supplier=Future+Electronics; ComponentLink3Description: http://www.fairchildsemi.com/ds/FS/FSUSB30.pdf?src-supplier=Future+Electronics; ComponentLink4URL: https://www.fairchildsemi.com/datasheets/FS/FSUSB30.pdf?src-supplier=Avnet+Europe; ComponentLink4Description: https://www.fairchildsemi.com/datasheets/FS/FSUSB30.pdf?src-supplier=Avnet+Europe; ComponentLink5URL: https://www.onsemi.com/pub/Collateral/FSUSB30-D.pdf?src-supplier=Digi-Key; ComponentLink5Description: https://www.onsemi.com/pub/Collateral/FSUSB30-D.pdf?src-supplier=Digi-Key; ComponentLink6URL: http://www.mouser.com/ds/2/149/FSUSB30-84238.pdf?src-supplier=Mouser; ComponentLink6Description: http://www.mouser.com/ds/2/149/FSUSB30-84238.pdf?src-supplier=Mouser; ComponentLink7URL: http://www.farnell.com/datasheets/1725753.pdf?src-supplier=Element14; ComponentLink7Description: http://www.farnell.com/datasheets/1725753.pdf?src-supplier=Element14; ComponentLink8URL: https://www.fairchildsemi.com/datasheets/FS/FSUSB30.pdf?src-supplier=Digi-Key; ComponentLink8Description: https://www.fairchildsemi.com/datasheets/FS/FSUSB30.pdf?src-supplier=Digi-Key; ComponentLink9URL: http://www.fairchildsemi.com/ds/FS/FSUSB30.pdf?src-supplier=Element14; ComponentLink9Description: http://www.fairchildsemi.com/ds/FS/FSUSB30.pdf?src-supplier=Element14; ComponentLink10URL: http://datasheet.iiic.cc/fairchild/FSUSB30MUX.pdf?src-supplier=IIIC; ComponentLink10Description: http://datasheet.iiic.cc/fairchild/FSUSB30MUX.pdf?src-supplier=IIIC; Supplier Part Number 1: FSUSB30MUXDKR-ND
footprint 10-MSOP (IC USB SWITCH 2X2 10MSOP)
pins: 1 S, 2 HSD1+, 3 HSD2+, 4 D+, 5 GND, 6 D-, 7 HSD2-, 8 HSD1-, 9 ~{OE}, 10 VCC

## FZT788BTA
designator Q?
TRANS PNP 15V 3A SOT-223; Manufacturer: Diodes Zetex; Max Power Dissipation: 2W; Frequency: 100MHz; Number of Elements: 1; Emitter Base Voltage (VEBO): 5V; Collector Emitter Saturation Voltage: -500mV; Element Configuration: Single; Voltage Rating (DC): -15V; Current Rating: -3A; Supplier 1: Digi-Key; Manufacturer Part Number: FZT788BTA; Stock 1: 2595; Pricing 1: 1=0.93, 10=0.817, 25=0.7672, 100=0.5568, 250=0.53696, 500=0.4652 (USD); Mount: Surface Mount; Case/Package: SOT-223; Number of Pins: 4; Weight: 0.000282oz; Min Operating Temperature: -55°C; Max Operating Temperature: 150°C; Collector Emitter Voltage (VCEO): 15V; Max Collector Current: 3A; Packaging: Tape and Reel; Package Quantity: 1000; Transition Frequency: 100MHz; Collector Emitter Breakdown Voltage: 15V; Polarity: PNP; Max Breakdown Voltage: 15V; Collector Base Voltage (VCBO): 15V; Power Dissipation: 2W; Gain Bandwidth Product: 100MHz; Max Frequency: 100MHz; Length: 6.7mm; Height: 1.65mm; Width: 3.7mm; Radiation Hardening: No; REACH SVHC: No SVHC; Lead Free: Lead Free; ComponentLink1URL: https://www.diodes.com/assets/Datasheets/FZT788B.pdf?src-supplier=Digi-Key; ComponentLink1Description: https://www.diodes.com/assets/Datasheets/FZT788B.pdf?src-supplier=Digi-Key; Supplier Part Number 1: FZT788BCT-ND
footprint FZT788BTA
pins: 1 B, 2 C, 3 E

## GPSR0850-470M
designator L?, comment 47uH
47uH ±20% 2A 206mΩ SMD,7.8x7.2x5mm Inductors (SMD) RoHS
footprint GPSR0850-470M (47uH ±20% 2A 206mO SMD)
pins: 1, 2

## GRM033R71E222KA12D
designator C?, comment 2.2nF
CAP CER 2200PF 25V X7R 0201; Manufacturer: Murata; Manufacturer Part Number: GRM033R71E222KA12D; Tolerance: 10%; Supplier 1: Digi-Key; Stock 1: 98550; Pricing 1: 1=0.1, 10=0.019, 100=0.0087, 500=0.0062, 1000=0.00487, 2500=0.00443, 5000=0.00407 (USD); Mount: Surface Mount; Case/Package: 0201; Weight: 1.2E-05oz; Case Code (Metric): 0603; Case Code (Imperial): 0201; Min Operating Temperature: -55°C; Max Operating Temperature: 125°C; Packaging: Tape and Reel; Capacitance: 2.2nF; Dielectric: X7R; Voltage Rating: 25V; Termination: SMD/SMT; Composition: Ceramic; Voltage Rating (DC): 25V; Package Quantity: 15000; Length: 0.6mm; Height: 0.3mm; Width: 0.012inch; Thickness: 0.013inch; Depth: 0.3mm; ComponentLink1URL: http://www.farnell.com/datasheets/2867852.pdf?src-supplier=Farnell; ComponentLink1Description: http://www.farnell.com/datasheets/2867852.pdf?src-supplier=Farnell; ComponentLink2URL: http://www.farnell.com/datasheets/2867852.pdf?src-supplier=Newark; ComponentLink2Description: http://www.farnell.com/datasheets/2867852.pdf?src-supplier=Newark; ComponentLink3URL: http://search.murata.co.jp/Ceramy/image/img/A01X/G101/ENG/GRM033R71E222KA12-01.pdf?src-supplier=Digi-Key; ComponentLink3Description: http://search.murata.co.jp/Ceramy/image/img/A01X/G101/ENG/GRM033R71E222KA12-01.pdf?src-supplier=Digi-Key; ComponentLink4URL: http://www.mouser.com/ds/2/281/c02e-2905.pdf?src-supplier=Mouser; ComponentLink4Description: http://www.mouser.com/ds/2/281/c02e-2905.pdf?src-supplier=Mouser; ComponentLink5URL: http://components.arrow.com/part/dataview/0323_05884394?src-supplier=Arrow+Europe; ComponentLink5Description: http://components.arrow.com/part/dataview/0323_05884394?src-supplier=Arrow+Europe; Supplier Part Number 1: 490-13335-6-ND
footprint Cap 0201
pins: 1, 2

## GRM155R61E105KA12D
designator C?, comment 1uF
CAP CER 1UF 25V X5R 0402; Manufacturer: Murata; Manufacturer Part Number: GRM155R61E105KA12D; Material: Ceramic; Tolerance: 10%; Supplier 1: Digi-Key; Stock 1: 1150750; Pricing 1: 1=0.11, 10=0.077, 100=0.0363, 500=0.02546, 1000=0.02108, 2500=0.01962, 5000=0.01795 (USD); Mount: Surface Mount; Case/Package: 0402; Weight: 0.000212oz; Case Code (Metric): 1005; Case Code (Imperial): 0402; Min Operating Temperature: -55°C; Max Operating Temperature: 85°C; Capacitance: 1uF; Voltage Rating: 25V; Packaging: Tape and Reel; Dielectric: X5R; Voltage: 25V; Termination: SMD/SMT; Voltage Rating (DC): 25V; Package Quantity: 10000; Length: 1mm; Height: 0.5mm; Width: 0.5mm; Thickness: 0.022inch; Depth: 0.5mm; REACH SVHC: No SVHC; Lead Free: Lead Free; ComponentLink1URL: http://www.farnell.com/datasheets/2048341.pdf?src-supplier=Element14; ComponentLink1Description: http://www.farnell.com/datasheets/2048341.pdf?src-supplier=Element14; Supplier Part Number 1: 490-10017-6-ND
footprint CAP 0402 (CC0402JRNPO9BN330)
pins: 1, 2

## GRM155R71H104ME14D
designator C?, comment 0.1uF
CAP CER 0.1UF 50V X7R 0402; Manufacturer: Murata; Manufacturer Part Number: GRM155R71H104ME14D; Tolerance: 20%; Capacitance: 100nF; Supplier 1: Digi-Key; Stock 1: 439844; Pricing 1: 1=0.1, 10=0.038, 100=0.0168, 500=0.01198, 1000=0.00941, 2500=0.00855, 5000=0.00787 (USD); Mount: Surface Mount; Case/Package: 0402; Min Operating Temperature: -55°C; Max Operating Temperature: 125°C; Packaging: Cut Tape; Voltage Rating: 50V; Length: 0.039inch; Width: 0.02inch; Thickness: 0.022inch; ComponentLink1URL: http://search.murata.co.jp/Ceramy/image/img/A01X/G101/ENG/GRM155R71H104ME14-01.pdf?src-supplier=Digi-Key; ComponentLink1Description: http://search.murata.co.jp/Ceramy/image/img/A01X/G101/ENG/GRM155R71H104ME14-01.pdf?src-supplier=Digi-Key; ComponentLink2URL: http://psearch.en.murata.com/capacitor/product/GRM155R71H104ME14%23.pdf?src-supplier=Avnet; ComponentLink2Description: http://psearch.en.murata.com/capacitor/product/GRM155R71H104ME14%23.pdf?src-supplier=Avnet; ComponentLink3URL: http://components.arrow.com/part/dataview/0323_07177683?src-supplier=Arrow+Europe; ComponentLink3Description: http://components.arrow.com/part/dataview/0323_07177683?src-supplier=Arrow+Europe; ComponentLink4URL: http://www.mouser.com/ds/2/281/c02e-2905.pdf?src-supplier=Mouser; ComponentLink4Description: http://www.mouser.com/ds/2/281/c02e-2905.pdf?src-supplier=Mouser; Supplier Part Number 1: 490-10701-1-ND
footprint CAP 0402 (CC0402JRNPO9BN330)
pins: 1, 2

## GRM188R6YA106MA73D
designator C?, comment 10uF
CAP CER 10UF 35V X5R 0603; Manufacturer: Murata; Manufacturer Part Number: GRM188R6YA106MA73D; Tolerance: 20%; Supplier 1: Digi-Key; Stock 1: 11640; Pricing 1: 1=0.5, 10=0.346, 100=0.2076, 500=0.1557, 1000=0.13148 (USD); Mount: Surface Mount; Case/Package: 0603; Case Code (Metric): 1608; Case Code (Imperial): 0603; Min Operating Temperature: -55°C; Max Operating Temperature: 85°C; Packaging: Tape and Reel; Capacitance: 10uF; Voltage Rating: 35V; Voltage Rating (DC): 35V; Dielectric: X5R; Length: 0.063inch; Width: 0.031inch; Thickness: 0.039inch; ComponentLink1URL: http://search.murata.co.jp/Ceramy/image/img/A01X/G101/ENG/GRM188R6YA106MA73-01.pdf?src-supplier=Digi-Key; ComponentLink1Description: http://search.murata.co.jp/Ceramy/image/img/A01X/G101/ENG/GRM188R6YA106MA73-01.pdf?src-supplier=Digi-Key; ComponentLink2URL: http://search.murata.co.jp/Ceramy/image/img/A01X/G101/ENG/GRM188R6YA106MA73-01.pdf?src-supplier=Mouser; ComponentLink2Description: http://search.murata.co.jp/Ceramy/image/img/A01X/G101/ENG/GRM188R6YA106MA73-01.pdf?src-supplier=Mouser; ComponentLink3URL: https://www.murata.com/~/media/webrenewal/support/library/catalog/products/capacitor/mlcc/c02e.ashx?la=en-us&src-supplier=Digi-Key; ComponentLink3Description: https://www.murata.com/~/media/webrenewal/support/library/catalog/products/capacitor/mlcc/c02e.ashx?la=en-us&src-supplier=Digi-Key; ComponentLink4URL: http://search.murata.co.jp/Ceramy/image/img/A01X/G101/ENG/GRM188R6YA106MA73-01.pdf?src-supplier=Future+Electronics; ComponentLink4Description: http://search.murata.co.jp/Ceramy/image/img/A01X/G101/ENG/GRM188R6YA106MA73-01.pdf?src-supplier=Future+Electronics; ComponentLink5URL: http://search.murata.co.jp/Ceramy/image/img/A01X/G101/ENG/GRM188R6YA106MA73-01.pdf?src-supplier=TTI; ComponentLink5Description: http://search.murata.co.jp/Ceramy/image/img/A01X/G101/ENG/GRM188R6YA106MA73-01.pdf?src-supplier=TTI; Supplier Part Number 1: 490-13248-6-ND
footprint Cap0603
pins: 1, 2

## Header R/A 4 Pin
designator J?, comment A2541HWR-4P
Female Header Female Socket 0.100"(2.54mm) 4 1 P=2.54mm Pin Header & Female Header RoHS; Manufacturer: CJT(Changjiang Connectors); Value: Custom; Manufacturer Part No: A2541HWR-4P; Package: Custom
footprint Header R/A 4Pin
pins: 1, 2, 3, 4

## LQW15AN1N6C80D
designator L?, comment 1.6NH
FIXED IND 1.6NH 1.45A 45 MOHM; Manufacturer: Murata; Manufacturer Part Number: LQW15AN1N6C80D; Core Material: Ferrite; Shielding: Unshielded; DC Resistance (DCR): 45mR; Self Resonant Frequency: 18GHz; Q Factor: 20; Test Frequency: 100MHz; Supplier 1: Digi-Key; Stock 1: 0; Pricing 1: 10000=0.0696 (USD); Mount: Surface Mount; Case/Package: 0402; Case Code (Metric): 1005; Case Code (Imperial): 0402; Min Operating Temperature: -55°C; Max Operating Temperature: 125°C; Packaging: Tape and Reel; Package Quantity: 10000; Inductance: 1.6nH; Max DC Current: 1.45A; Termination: SMD/SMT; Composition: Wirewound; Current Rating: 1.45A; Length: 0.039inch; Height: 0.5mm; Width: 0.5mm; Height - Seated (Max): 0.024inch; ComponentLink1URL: http://www.mouser.com/ds/2/281/o05e-522697.pdf?src-supplier=Mouser; ComponentLink1Description: http://www.mouser.com/ds/2/281/o05e-522697.pdf?src-supplier=Mouser; ComponentLink2URL: http://www.murata.com/~/media/webrenewal/support/library/catalog/products/inductor/chip/o05e.ashx?src-supplier=Digi-Key; ComponentLink2Description: http://www.murata.com/~/media/webrenewal/support/library/catalog/products/inductor/chip/o05e.ashx?src-supplier=Digi-Key; Supplier Part Number 1: LQW15AN1N6C80D-ND
footprint IND 0402 (1005 Metric) (FIXED IND 20NH 350MA 600 MOHM)
pins: 1, 2

## MJD31CT4G
designator Q?
TRANS NPN 100V 3A DPAK; Manufacturer: ON Semiconductor; Max Power Dissipation: 1.56W; Transition Frequency: 3MHz; hFE Min: 25; Number of Elements: 1; Emitter Base Voltage (VEBO): 5V; Collector Emitter Saturation Voltage: 1.2V; Element Configuration: Single; Supplier 1: Digi-Key; Manufacturer Part Number: MJD31CT4G; Stock 1: 48908; Pricing 1: 1=0.5, 10=0.427, 25=0.3988, 100=0.2961, 250=0.28132, 500=0.23122, 1000=0.18794 (USD); Case/Package: DPAK; Number of Pins: 3; Contact Plating: Tin,Matte; Min Operating Temperature: -65°C; Max Operating Temperature: 150°C; Collector Emitter Voltage (VCEO): 100V; Packaging: Tape and Reel; Max Collector Current: 3A; Collector Emitter Breakdown Voltage: 100V; Polarity: NPN; Max Breakdown Voltage: 100V; Package Quantity: 1; Frequency: 3MHz; Collector Base Voltage (VCBO): 100V; Power Dissipation: 1.56W; Gain Bandwidth Product: 3MHz; Max Frequency: 3MHz; Voltage Rating (DC): 100V; Current Rating: 3A; Length: 6.73mm; Height: 2.38mm; Width: 6.22mm; Radiation Hardening: No; REACH SVHC: No SVHC; Lead Free: Lead Free; ComponentLink1URL: http://www.onsemi.com/pub/Collateral/MJD31-D.PDF?src-supplier=Digi-Key; ComponentLink1Description: http://www.onsemi.com/pub/Collateral/MJD31-D.PDF?src-supplier=Digi-Key; ComponentLink2URL: http://www.onsemi.com/pub/Collateral/MJD31-D.PDF?src-supplier=Avnet; ComponentLink2Description: http://www.onsemi.com/pub/Collateral/MJD31-D.PDF?src-supplier=Avnet; ComponentLink3URL: http://www.onsemi.com/pub/Collateral/MJD31-D.PDF?src-supplier=Element14; ComponentLink3Description: http://www.onsemi.com/pub/Collateral/MJD31-D.PDF?src-supplier=Element14; ComponentLink4URL: http://www.mouser.com/ds/2/308/MJD31-D-90514.pdf?src-supplier=Mouser; ComponentLink4Description: http://www.mouser.com/ds/2/308/MJD31-D-90514.pdf?src-supplier=Mouser; ComponentLink5URL: http://www.jameco.com/Jameco/Products/ProdDS/1055943.pdf?src-supplier=Jameco; ComponentLink5Description: http://www.jameco.com/Jameco/Products/ProdDS/1055943.pdf?src-supplier=Jameco; ComponentLink6URL: http://www.onsemi.com/pub_link/Collateral/MJD31-D.PDF?src-supplier=Element14; ComponentLink6Description: http://www.onsemi.com/pub_link/Collateral/MJD31-D.PDF?src-supplier=Element14; ComponentLink7URL: http://www.onsemi.com/pub/Collateral/MJD31-D.PDF?src-supplier=Future+Electronics; ComponentLink7Description: http://www.onsemi.com/pub/Collateral/MJD31-D.PDF?src-supplier=Future+Electronics; Supplier Part Number 1: MJD31CT4GOSDKR-ND
footprint DPAK (TRANS PNP 100V 3A DPAK)
pins: 1 B, 2_4 C, 3 E

## MJD32CT4G
designator Q?
TRANS PNP 100V 3A DPAK
footprint DPAK (TRANS PNP 100V 3A DPAK)
pins: 1 B, 2_4 C, 3 E

## MP26123DR-LF-Z
designator U?
IC BATT CHRG LI-ION; Manufacturer: Monolithic Power Systems; Max Supply Voltage: 24V; Max Charge Current: 2A; Battery Pack Voltage: 12.6V; Output Voltage: 8.463V; Fault Protection: Over Current,Over Temperature; Supplier 1: Digi-Key; Manufacturer Part Number: MP26123DR-LF-Z; Stock 1: 824; Pricing 1: 1=4.64, 10=4.165, 25=3.9376, 100=3.2375, 250=2.905, 500=2.8, 1000=2.3275, 2500=2.24 (USD); Mount: Surface Mount; Case/Package: VQFN; Number of Pins: 16; Min Operating Temperature: -40°C; Max Operating Temperature: 85°C; Packaging: Tape and Reel; Package Quantity: 5000; Output Current: 2A; Lead Free: Lead Free; ComponentLink1URL: https://www.monolithicpower.com/DesktopModules/DocumentManage/API/Document/GetDocument?id=1099&src-supplier=Avnet+Asia; ComponentLink1Description: https://www.monolithicpower.com/DesktopModules/DocumentManage/API/Document/GetDocument?id=1099&src-supplier=Avnet+Asia; ComponentLink2URL: http://www.mouser.com/ds/2/277/MP26123_r1.01-472005.pdf?src-supplier=Mouser; ComponentLink2Description: http://www.mouser.com/ds/2/277/MP26123_r1.01-472005.pdf?src-supplier=Mouser; ComponentLink3URL: http://www.monolithicpower.com/DesktopModules/DocumentManage/API/Document/getDocument?id=1099&src-supplier=Digi-Key; ComponentLink3Description: http://www.monolithicpower.com/DesktopModules/DocumentManage/API/Document/getDocument?id=1099&src-supplier=Digi-Key; Supplier Part Number 1: 1589-1609-6-ND
footprint 16-QFN (4x4) (IC BATT CHRG LI-ION)
pins: 1 VCC, 2 NTC, 3 ACOK, 4 CHGOK, 5 VREF33, 6 EN, 7 CELLS, 8 COMPV, 9 GND, 10 CSP, 11 BATT, 12 COMPI, 13 TMR, 14 BST, 15 SW, 16 VIN, 17 GND

## MS0530-2R2M
designator U?
2.2uH ±20% 5.5A 29mΩ SMD,5.75x5.2x3mm Inductors (SMD) RoHS; Manufacturer: COILMX; Manufacturer Part No: MS0530-2R2M; Package: Custom; Value: 2.2uH
footprint MS0530-2R2M
pins: 1, 2

## MTF185-204SY1
designator J?
Female Header Female Socket 0.100"(2.54mm) 8 2 Through Hole,P=2.54mm Pin Header & Female Header RoHS
footprint MTF185-204SY1 (Female Header Female Socket 0.100"(2.54mm) 8 2 Through Hole)
pins: 1, 2, 3, 4, 5, 6, 7, 8

## NCP03XH103F05RL
designator RT?, comment 10K
THERMISTOR NTC 10KOHM 3380K 0201; Manufacturer: Murata; Manufacturer Part Number: NCP03XH103F05RL; Tolerance: 1%; Resistance: 10kR; Power Rating: 100mW; Supplier 1: Digi-Key; Stock 1: 221601; Pricing 1: 1=0.28, 5=0.27, 10=0.24, 25=0.2208, 50=0.1764, 100=0.1513, 500=0.13236, 1000=0.11345, 5000=0.10085 (USD); Mount: Surface Mount; Case/Package: 0201; Number of Pins: 2; Case Code (Metric): 0603; Case Code (Imperial): 0201; Min Operating Temperature: -40°C; Max Operating Temperature: 125°C; Packaging: Tape and Reel; Package Quantity: 1; Max Power Dissipation: 100mW; Termination: SMD/SMT; Length: 0.6mm; Height: 0.3mm; Width: 0.3mm; Depth: 0.3mm; Radiation Hardening: No; Lead Free: Lead Free; ComponentLink1URL: http://www.murata.com/products/catalog/pdf/r44e.pdf?src-supplier=Avnet+Europe; ComponentLink1Description: http://www.murata.com/products/catalog/pdf/r44e.pdf?src-supplier=Avnet+Europe; ComponentLink2URL: http://components.arrow.com/part/dataview/51404656S675687N2606?src-supplier=Arrow; ComponentLink2Description: http://components.arrow.com/part/dataview/51404656S675687N2606?src-supplier=Arrow; ComponentLink3URL: http://www.murata.com/products/catalog/pdf/r44e.pdf?src-supplier=Digi-Key; ComponentLink3Description: http://www.murata.com/products/catalog/pdf/r44e.pdf?src-supplier=Digi-Key; ComponentLink4URL: http://www.murata.com/~/media/webrenewal/support/library/catalog/products/thermistor/ntc/r44e.ashx?src-supplier=Avnet; ComponentLink4Description: http://www.murata.com/~/media/webrenewal/support/library/catalog/products/thermistor/ntc/r44e.ashx?src-supplier=Avnet; ComponentLink5URL: http://www.mouser.com/ds/2/281/r44e-3685.pdf?src-supplier=Mouser; ComponentLink5Description: http://www.mouser.com/ds/2/281/r44e-3685.pdf?src-supplier=Mouser; ComponentLink6URL: http://components.arrow.com/part/dataview/0323_03440904?src-supplier=Arrow+Europe; ComponentLink6Description: http://components.arrow.com/part/dataview/0323_03440904?src-supplier=Arrow+Europe; ComponentLink7URL: https://www.murata.com/~/media/webrenewal/support/library/catalog/products/thermistor/r01e.ashx?src-supplier=Digi-Key; ComponentLink7Description: https://www.murata.com/~/media/webrenewal/support/library/catalog/products/thermistor/r01e.ashx?src-supplier=Digi-Key; Supplier Part Number 1: 490-11806-6-ND
footprint Res-0201
pins: 1, 2